# Altium schematic symbol library 1N5819WS_C191023.SchLib: 1 symbol
Pins are listed as number, name and electrical type; pins without a type are passive.

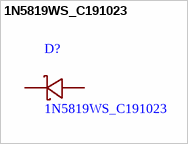
[diagram p0: symbol 1N5819WS_C191023]

## 1N5819WS_C191023
designator D?
电压:40V 电流:1A / 正向压降(Vf):600mV@1A / 直流反向耐压(Vr):40V / 整流电流:1A / 型号:1N5819WS_C191023 / LCSC C191023 / 厂牌:Hottech(合科泰)
footprint SOD-323_L1.8-W1.3-LS2.5-RD (PCB footprint)
pins: 1 K, 2 A